# Altium footprint library bs_libs.PcbLib: 125 footprints (part 7 of 8)
Each footprint in its own frame and in the unit in brackets; x right, y up, seen from the top. Pads: shape width x height; smd on the part's side, far side on the other; paste and mask are expansions set on the pad; w line width, h text height; cw(c..) or ccw(c..) is an arc to the next point about the centre after c.
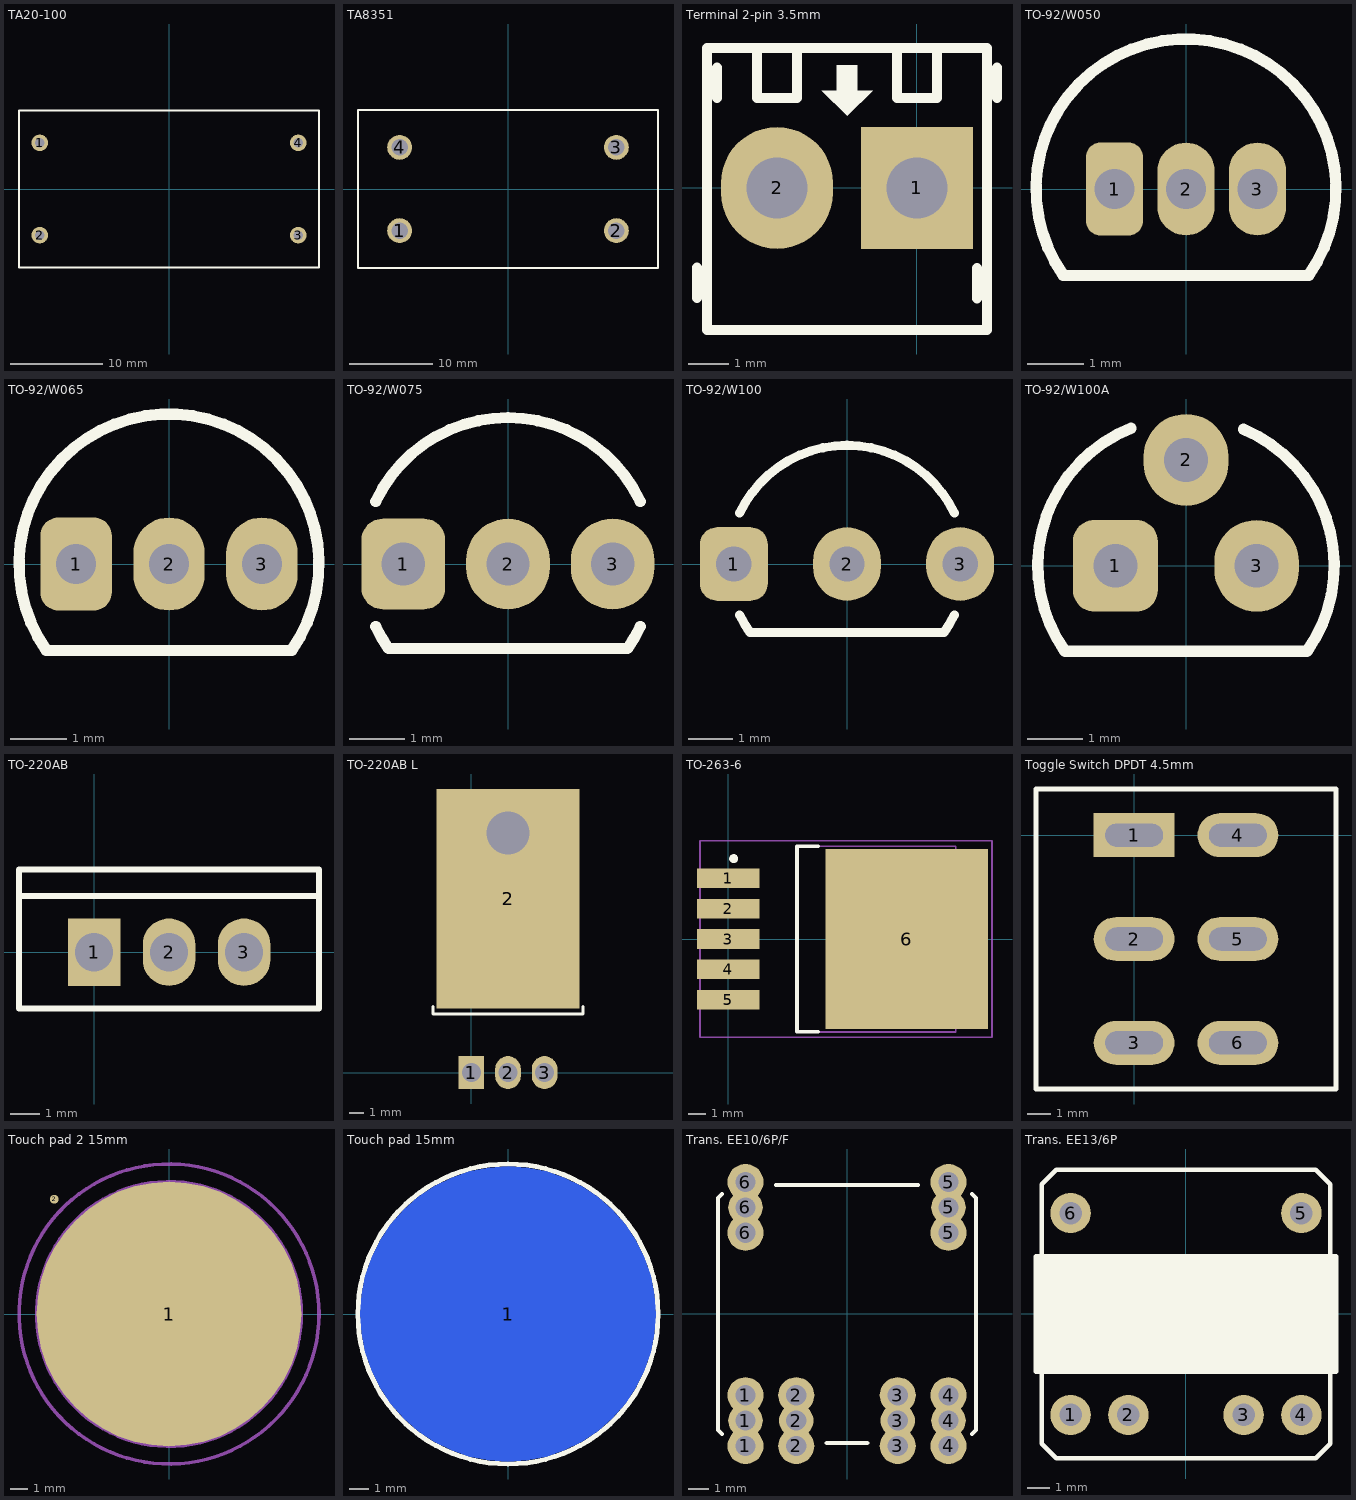
[diagram p6: the footprints below, top view; thin cyan lines are the x and y axes]

## TA20-100 [mm]
pads (4):
  round 1.8 hole 1: 1(-14,5) 2(-14,-5) 3(14,-5) 4(14,5)
Top Overlay:
  lines w0.254: -16.25,-8.5 16.25,-8.5 16.25,8.5 -16.25,8.5 -16.25,-8.5
3D body "TA20-100.step": height 32.5, standoff -5, extent -16.25,-8.5 16.25,8.5

## TA8351 [mm]
pads (4):
  round 3 hole 2: 1(-13,-5) 2(13,-5) 3(13,5) 4(-13,5)
Top Overlay:
  lines w0.254: -18,-9.5 -18,9.5 18,9.5 18,-9.5 -18,-9.5
3D body "TA8351.step": height 40, standoff 0, extent -18,-9.5 18,9.5

## Terminal 2-pin 3.5mm [mil]
pads (2):
  rect 110x120 hole 60: 1(0,0)
  oval 110x120 hole 60: 2(-137.8,0)
Top Overlay:
  region: -68.74,70.77 -43.74,95.77 -58.74,95.77 -58.74,120.77 -78.74,120.77 -78.74,95.77 -93.74,95.77
  lines w10: -216.54,-108.27 -216.54,-78.27 ; -206.69,137.8 -206.69,-140 68.9,-140 68.9,137.8 -204.57,137.8 ; -196.85,88.58 -196.85,118.58 ; -157.48,137.8 -157.48,88.58 -118.11,88.58 -118.11,137.8 ; -19.68,137.8 -19.68,88.58 19.68,88.58 19.68,137.8 ; 59.06,-108.74 59.06,-78.74 ; 78.74,88.58 78.74,118.58
3D body "User Library-Terminal Block 2 way 3.5mm.step": height 335.04, standoff -137.8, extent -208.89,-143.5 71.11,143.51

## TO-92/W050 [mil]
pads (3):
  rrect50% 40x65 hole 28: 1(-50,0)
  oval 40x65 hole 28: 2(0,0) 3(50,0)
Top Overlay:
  lines w8: -85.7,-60.49 cw(c0,0) 85.7,-60.49 -85.7,-60.49
3D body "User Library-TO-92-100.step": height 219.84, standoff -490, extent -113.7,-60.24 112.28,104.72

## TO-92/W065 [mil]
pads (3):
  rrect50% 50x65 hole 28: 1(-65,0)
  oval 50x65 hole 28: 2(0,0) 3(65,0)
Top Overlay:
  lines w8: -85.7,-60.49 cw(c0,0) 85.7,-60.49 -85.7,-60.49
3D body "User Library-TO-92-100.step": height 279.84, standoff -430, extent -113.7,-60.24 112.28,104.72

## TO-92/W075 [mil]
pads (3):
  rrect50% 60x65 hole 31: 1(-75,0)
  oval 60x65 hole 31: 2(0,0) 3(75,0)
Top Overlay:
  lines w8: -94.8,-44.91 ccw(c0,0) -85.7,-60.49 85.7,-60.49 ccw(c0,0) 94.8,-44.91 ; -94.8,44.91 cw(c0,0) 94.8,44.91
3D body "User Library-TO-92-100.step": height 299.84, standoff -410, extent -113.7,-60.24 112.28,104.72

## TO-92/W100 [mil]
pads (3):
  rrect50% 60x65 hole 31: 1(-100,0)
  oval 60x65 hole 31: 2(0,0) 3(100,0)
Top Overlay:
  lines w8: -94.8,-44.91 ccw(c0,0) -85.7,-60.49 85.7,-60.49 ccw(c0,0) 94.8,-44.91 ; -94.8,44.91 cw(c0,0) 94.8,44.91
3D body "User Library-TO-92-100.step": height 369.84, standoff -340, extent -113.7,-60.24 112.28,104.72

## TO-92/W100A [mil]
pads (3):
  rrect50% 60x65 hole 31: 1(-50,0)
  oval 60x65 hole 31: 2(0,75) 3(50,0)
Top Overlay:
  lines w8: -38.96,97.4 ccw(c0,0) -85.7,-60.49 85.7,-60.49 ccw(c0,0) 40.71,96.68
3D body "User Library-TO-92-100A.STEP": height 317.95, standoff -167.48, extent -104.73,-60 104.72,103.78

## TO-220AB [mil]
pads (3):
  rect 70x90 hole 51.18: 1(0,0)
  oval 70x90 hole 51.18: 2(100,0) 3(200,0)
Top Overlay:
  lines w8: -100,75 300,75 ; -100,-75 -100,110 300,110 300,-75 -100,-75
3D body "User Library-TO-220-4.STEP": height 767.41, standoff -366.45, extent -100.79,-70 300.79,107.16

## TO-220AB L [mil]
pads (5):
  rect 70x90 hole 51.18: 1(0,0)
  oval 70x90 hole 51.18: 2(100,0) 3(200,0)
  rect 390x600 smd: 2(100,475)
  round 0 hole 118.11: 2(100,655)
Top Overlay:
  lines w8: -105,180 -105,160 305,160 305,180
3D body "User Library-TO-220AB-L.step": height 177.17, standoff -118.11, extent -96.85,-10 296.85,765.76

## TO-263-6 [mm] "D2-PAK, 6-Pads, Body 8.9x10.4mm (max), IPC Medium Density"
height 4.65
pads (6):
  rect 3.5x1.1 smd: 1(0,3.4) 2(0,1.7) 3(0,0) 4(0,-1.7) 5(0,-3.4)
  rect 9.1x10.1 smd: 6(10,0)
Top Overlay:
  circle w0.25: c0.3,4.5 r0.125
  lines w0.2: 5.05,-5.2 3.85,-5.2 3.85,5.2 5.05,5.2
Mechanical 13:
  lines w0.1: 3.85,-5.2 12.74,-5.2 12.74,5.2 3.85,5.2 3.85,-5.2
Mechanical 15:
  lines w0.1: 6.1,0 7.1,0 ; 6.6,-0.5 6.6,0.5 ; -1.575,-5.5 14.775,-5.5 14.775,5.5 -1.575,5.5 -1.575,-5.5
3D body "SW3dPS-TO263-5.STEP": height 4.83, standoff 0.03, extent -0.956,-4.978 14.714,5.022

## Toggle Switch DPDT 4.5mm [mm]
pads (6):
  rect 3.5x1.9 hole 1 slot 2.5 at 0 deg: 1(0,0)
  oval 3.5x1.9 hole 1 slot 2.5 at 0 deg: 2(0,-4.5) 3(0,-9) 4(4.5,0) 5(4.5,-4.5) 6(4.5,-9)
Top Overlay:
  lines w0.2: -4.25,-11 -4.25,2 8.75,2 8.75,-11 -4.25,-11
3D body "User Library-toggle_sw.step": height 39.6, standoff -6.5, extent -3.568,-10.835 8.092,1.825

## Touch pad 2 15mm [mm]
pads (2):
  round 15 smd: 1(0,0)
  round 0.5 smd: 2(-6.5,6.5)
Mechanical 31:
  circle w0.203: c0,0 r8.5
  circle w0.203: c0,0 r7.5

## Touch pad 15mm [mm]
pads (1):
  round 15 smd far side: 1(0,0)
Top Overlay:
  circle w0.152: c0,0 r6.99
  circle w0.254: c0,0 r7.62

## Trans. EE10/6P/F [mm] "Tranformer EE13 6PIN"
pads (18):
  round 1.778 hole 0.991: 1(-5,-6.5) 1(-5,-4) 2(-2.5,-6.5) 2(-2.5,-4) 3(2.5,-6.5) 3(2.5,-4) 4(5,-6.5) 4(5,-4) 5(5,4) 5(5,6.5) 6(-5,4) 6(-5,6.5)
  round 1.7 hole 1: 1(-5,-5.25) 2(-2.5,-5.25) 3(2.5,-5.25) 4(5,-5.25) 5(5,5.25) 6(-5,5.25)
Top Overlay:
  lines w0.203: -6.158,-5.908 -6.35,-5.715 -6.35,5.715 -6.158,5.907 ; -3.5,6.35 3.5,6.35 ; -1,-6.35 1,-6.35 ; 6.157,-5.908 6.35,-5.715 6.35,5.715 6.157,5.907
3D body: height 11.43, standoff 10.16, extent -5.715,-5.715 5.715,5.715
3D body: height 10.16, standoff 2.54, extent -5.08,-5.08 5.08,5.08
3D body: height 2.54, standoff 0, extent -6.35,-6.35 6.35,6.35
3D body: height 0, standoff -2.54, extent -5.433,4.09 -4.724,4.8
3D body: height 0, standoff -2.54, extent 4.727,4.09 5.436,4.8
3D body: height 0, standoff -2.54, extent -5.433,-4.8 -4.724,-4.09
3D body: height 0, standoff -2.54, extent -2.893,-4.8 -2.184,-4.09
3D body: height 0, standoff -2.54, extent 2.187,-4.8 2.896,-4.09
3D body: height 0, standoff -2.54, extent 4.727,-4.8 5.436,-4.09

## Trans. EE13/6P [mil] "Tranformer EE13 6PIN"
pads (6):
  round 70 hole 39: 1(-200,-175) 2(-100,-175) 3(100,-175) 4(200,-175) 5(200,175) 6(-200,175)
Top Overlay:
  rectangle: -260,-100 260,100
  lines w8: -260,-100 260,-100 260,100 -260,100 -260,-100 ; -250,-225 -250,225 -225,250 225,250 250,225 250,-225 225,-250 -225,-250 -250,-225
3D body: height 450, standoff 400, extent -225,-225 225,225
3D body: height 400, standoff 100, extent -200,-200 200,200
3D body: height 500, standoff 0, extent -260,-100 260,100
3D body: height 100, standoff 0, extent -250,-250 250,250
3D body: height 0, standoff -100, extent -213.88,161.03 -186,188.98
3D body: height 0, standoff -100, extent 186.12,161.04 214.01,188.98
3D body: height 0, standoff -100, extent -213.88,-188.96 -185.99,-161.02
3D body: height 0, standoff -100, extent -113.88,-188.96 -85.99,-161.02
3D body: height 0, standoff -100, extent 86.12,-188.96 114.01,-161.02
3D body: height 0, standoff -100, extent 186.12,-188.96 214.01,-161.02